# Altium footprint library Mechanical.PcbLib: 49 footprints (part 4 of 4)
Each footprint in its own frame and in the unit in brackets; x right, y up, seen from the top. Pads: shape width x height; smd on the part's side, far side on the other; paste and mask are expansions set on the pad; w line width, h text height; cw(c..) or ccw(c..) is an arc to the next point about the centre after c.
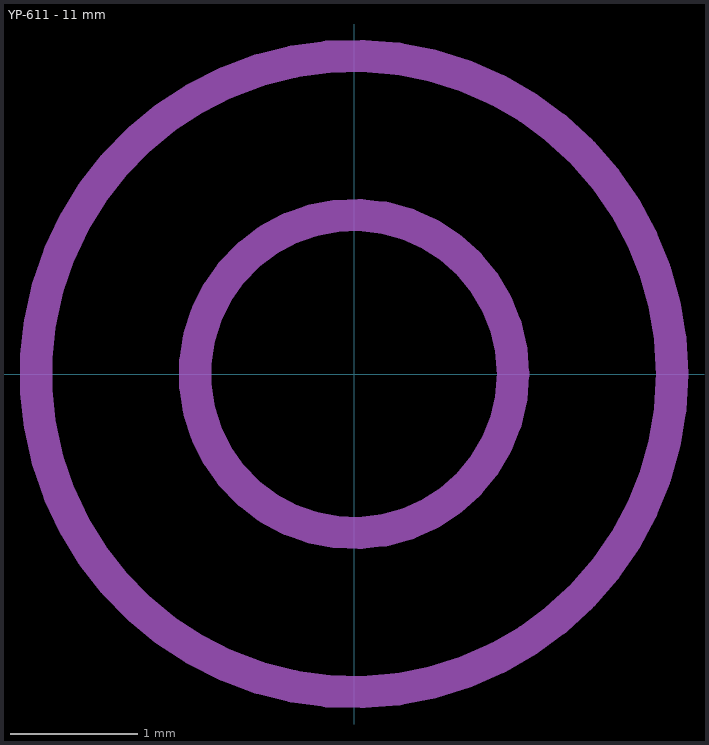
[diagram p3: the footprint, top view; thin cyan lines are the x and y axes]

## YP-611 - 11 mm [mm]
Bottom Designator:
  circle w0.254: c0,0 r2.5
  circle w0.254: c0,0 r1.25
3D body "YP-611 v1.step": height 11, standoff 0, extent -2.5,-2.497 2.5,2.497